# Altium footprint library Connectors.PcbLib: 113 footprints (part 2 of 8)
Each footprint in its own frame and in the unit in brackets; x right, y up, seen from the top. Pads: shape width x height; smd on the part's side, far side on the other; paste and mask are expansions set on the pad; w line width, h text height; cw(c..) or ccw(c..) is an arc to the next point about the centre after c.
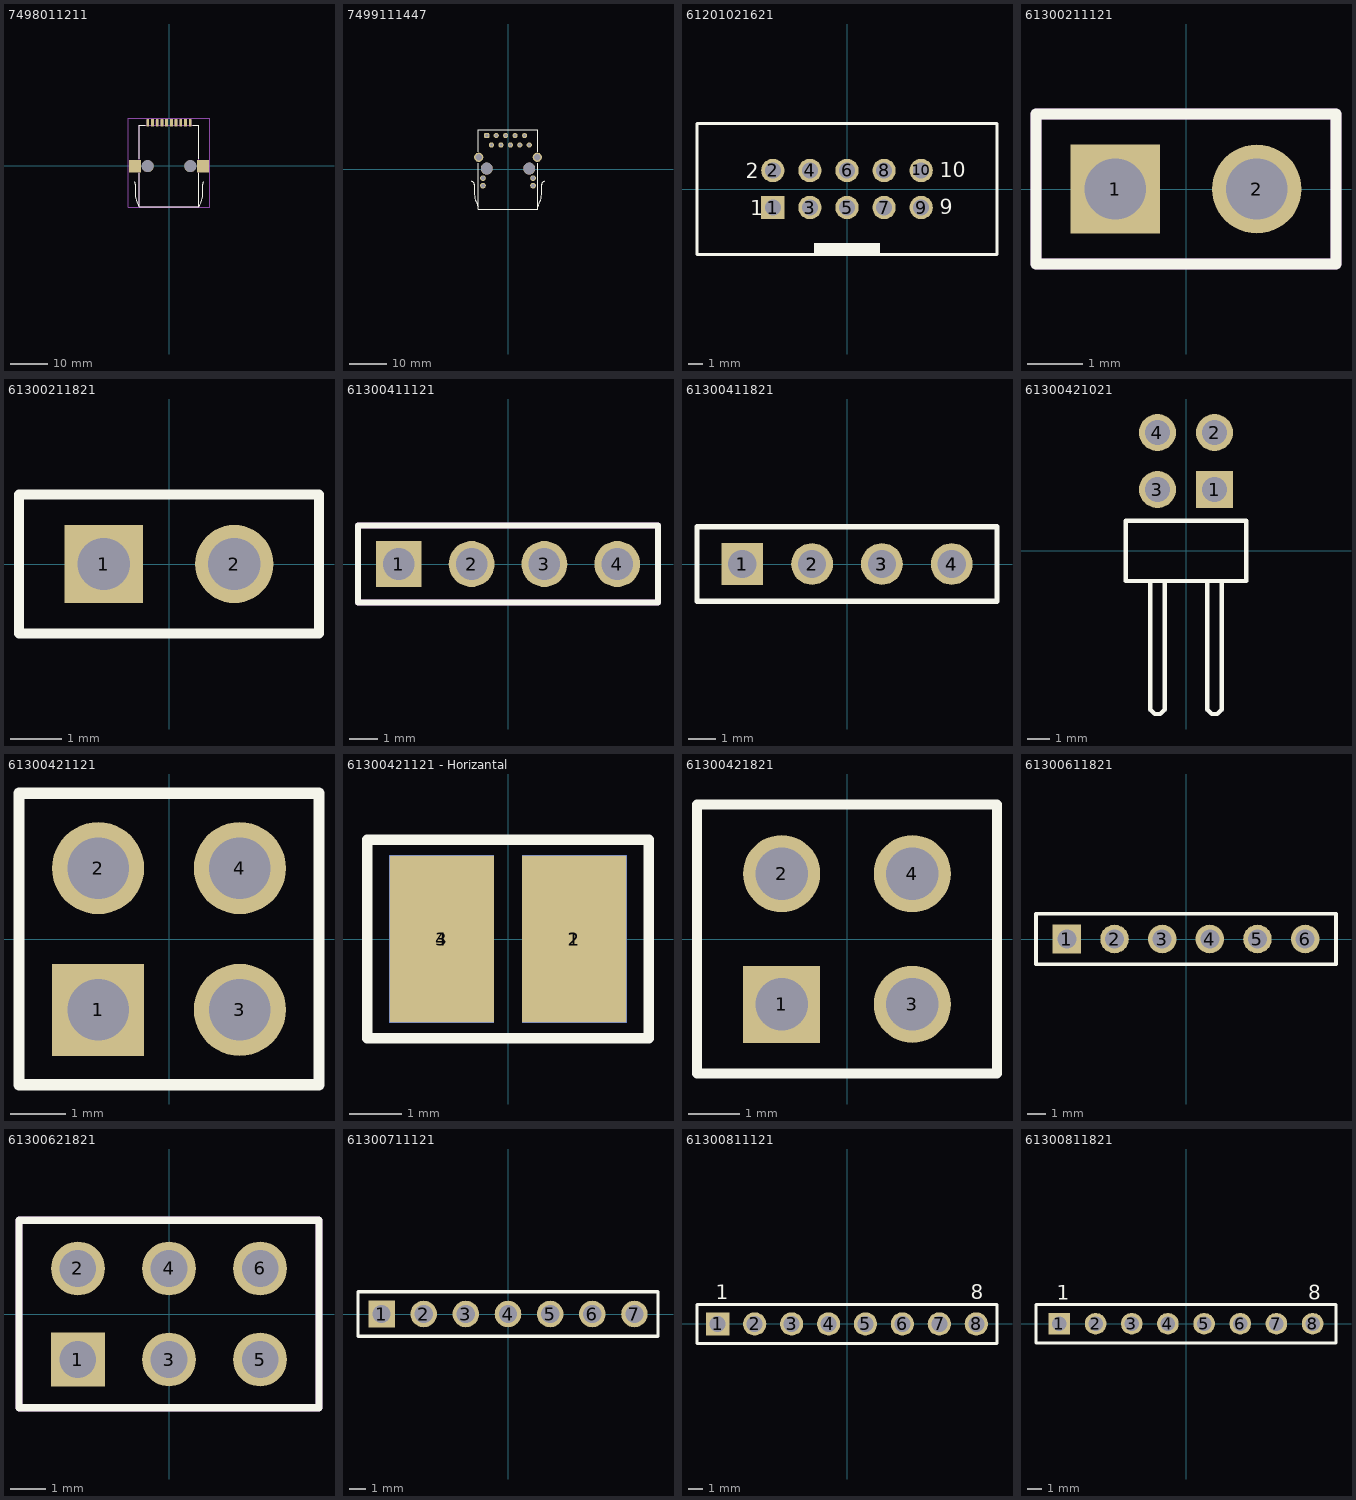
[diagram p1: the footprints below, top view; thin cyan lines are the x and y axes]

## 7498011211 [mm] "LAN Transformer, body 21.65x15.88mm"
height 13.5
pads (14):
  rect 0.76x2.03 smd: 1(-5.715,11.615) 2(-4.445,11.615) 3(-3.175,11.615) 4(-1.905,11.615) 5(-0.635,11.615) 6(0.635,11.615) 7(1.905,11.615) 8(3.175,11.615) 9(4.445,11.615) 10(5.715,11.615)
  round 3.22 hole 3.22 unplated: MH1(-5.715,-0.065) MH2(5.715,-0.065)
  rect 3.3x3.3 smd: Shell(-9.145,-0.065) Shell(9.145,-0.065)
Top Overlay:
  lines w0.2: -9.209,-4.228 cw(c-10.32,-4.84) -9.053,-4.897 ccw(c-5.438,-5.337) -9.08,-5.367 ccw(c15.584,-6.195) -9.009,-8.239 ccw(c-0.59,-6.72) -8.04,-10.925 ; -8.04,-2.025 -8.04,-10.925 ; -8.04,1.875 -8.04,10.925 -6.39,10.925 ; 6.36,10.925 8.04,10.925 8.04,1.875 ; 8.04,-2.025 8.04,-10.925 ; 9.209,-4.228 ccw(c10.32,-4.84) 9.053,-4.897 cw(c5.438,-5.337) 9.08,-5.367 cw(c-15.584,-6.195) 9.009,-8.239 cw(c0.59,-6.72) 8.04,-10.925 ; -8.04,-10.925 8.04,-10.925
Top Assembly:
  rectangle: -6.1,10.925 -5.344,12.348
  rectangle: -4.83,10.925 -4.074,12.348
  rectangle: -3.56,10.925 -2.804,12.348
  rectangle: -2.29,10.925 -1.534,12.348
  rectangle: -1.02,10.925 -0.264,12.348
  rectangle: 0.25,10.925 1.006,12.348
  rectangle: 1.52,10.925 2.276,12.348
  rectangle: 2.79,10.925 3.546,12.348
  rectangle: 4.06,10.925 4.816,12.348
  rectangle: 5.33,10.925 6.086,12.348
  rectangle: -10.3,-1.3 -8.04,1.108
  region: 10.3,1.17 8.04,1.17 8.04,-1.238 10.3,-1.238
  lines w0.2: -8.04,-10.925 8.04,-10.925 8.04,10.925 -8.04,10.925 -8.04,-10.925
  text ".Designator" at -7.498,4.3 h1.5
Mechanical 15:
  lines w0.05: -10.995,-11.125 -10.995,12.83 10.995,12.83 10.995,-11.125 -10.995,-11.125
3D body "7498011211.stp": height 14.82, standoff -2.7, extent -10.249,-10.79 10.25,12.36

## 7499111447 [mm] "LAN Transformer, body 21.3x16mm"
height 13.55
pads (18):
  rrect50% 1.4x1.4 hole 0.89: 1(-5.715,9.09)
  round 1.4 hole 0.89: 2(-4.445,6.55) 3(-3.175,9.09) 4(-1.905,6.55) 5(-0.635,9.09) 6(0.635,6.55) 7(1.905,9.09) 8(3.175,6.55) 9(4.445,9.09) 10(5.715,6.55)
  round 1.52 hole 1.02: 11(-6.725,-2.34) 12(-6.725,-4.37) 13(6.725,-2.34) 14(6.725,-4.37)
  round 3.2 hole 3.2 unplated: MH1(-5.715,0.2) MH2(5.715,0.2)
  round 2.5 hole 1.7: Shell(-7.875,3.25) Shell(7.875,3.25)
Top Overlay:
  lines w0.2: -9.683,-3.231 cw(c-9.9,-4.1) -9.004,-4.1 ; -9.013,-3.972 ccw(c-5.398,-4.412) -9.04,-4.442 ccw(c15.624,-5.27) -8.969,-7.314 ccw(c-0.55,-5.795) -8,-10 ; -8,1.7 -8,-10.65 8,-10.65 8,1.7 ; -8,4.8 -8,10.65 8,10.65 8,4.8 ; 8,-10 ccw(c0.55,-5.795) 8.969,-7.314 ccw(c-15.624,-5.27) 9.04,-4.442 ccw(c5.398,-4.412) 9.013,-3.972 ; 9.004,-4.1 cw(c9.9,-4.1) 9.683,-3.231
3D body "7499111447.stp": height 15.35, standoff -2.98, extent -9.724,-10.65 9.724,10.65

## 61201021621 [mm] "10 pins, straight, gold plating"
height 9.1
pads (10):
  rect 1.6x1.6 hole 1.1: 1(-5.08,-1.27)
  round 1.6 hole 1.1: 2(-5.08,1.27) 3(-2.54,-1.27) 4(-2.54,1.27) 5(0,-1.27) 6(0,1.27) 7(2.54,-1.27) 8(2.54,1.27) 9(5.08,-1.27) 10(5.08,1.27)
Top Overlay:
  rectangle: -2.25,-4.5 2.25,-3.7
  lines w0.2: -10.28,-4.5 10.28,-4.5 10.28,4.5 -10.28,4.5 -10.28,-4.5
  text "1" at -6.64,-1.8 h1.02
  text "2" at -6.94,0.74 h1.02
  text "10" at 6.34,0.8 h1.02
  text "9" at 6.34,-1.74 h1.02
3D body "61201021621.stp": height 9.13, standoff -2.98, extent -10.18,-4.425 10.18,4.75

## 61300211121 [mm] "Pin Header, pitch 2.54 mm, THT, Vertical, single row, 2p"
height 8.54
pads (2):
  rect 1.6x1.6 hole 1.1: 1(-1.27,0)
  round 1.6 hole 1.1: 2(1.27,0)
Top Overlay:
  lines w0.2: -2.69,-1.345 2.69,-1.345 2.69,1.345 -2.69,1.345 -2.69,-1.345
Top Assembly:
  rectangle: -1.77,-0.461 -0.77,0.539
  rectangle: 0.77,-0.5 1.77,0.5
  lines w0.2: -2.69,-1.345 2.69,-1.345 2.69,1.345 -2.69,1.345 -2.69,-1.345
  text ".Designator" at 0.233,-3.499 h0.7
3D body "61300211121.stp": height 8.57, standoff -2.97, extent -2.54,-1.27 2.54,1.27

## 61300211821 [mm] "Socket Header, Pitch 2.54 mm, THT, Vertical, single row, 2p"
height 8.5
pads (2):
  rect 1.52x1.52 hole 1.02: 1(-1.27,0)
  round 1.52 hole 1.02: 2(1.27,0)
Top Overlay:
  lines w0.2: -2.915,-1.35 2.915,-1.35 2.915,1.35 -2.915,1.35 -2.915,-1.35
3D body "61300211821.stp": height 8.55, standoff -3.06, extent -2.79,-1.25 2.79,1.25

## 61300411121 [mm] "Pin Header, pitch 2.54 mm, THT, Vertical, single row, 4p"
height 8.54
pads (4):
  rect 1.6x1.6 hole 1.1: 1(-3.81,0)
  round 1.6 hole 1.1: 2(-1.27,0) 3(1.27,0) 4(3.81,0)
Top Overlay:
  lines w0.2: -5.23,-1.345 -5.23,1.345 5.23,1.345 5.23,-1.345 -5.23,-1.345
Top Assembly:
  rectangle: 3.318,-0.5 4.318,0.5
  rectangle: 0.778,-0.5 1.778,0.5
  rectangle: -4.302,-0.492 -3.302,0.508
  rectangle: -1.762,-0.5 -0.762,0.5
  lines w0.2: -5.23,-1.345 -5.23,1.345 5.23,1.345 5.23,-1.345 -5.23,-1.345
  text "4" at 3.643,-1.139 h0.5
  text "3" at 1.103,-1.139 h0.5
  text "2" at -1.437,-1.139 h0.5
  text "1" at -3.893,-1.139 h0.5
  text ".Designator" at -0.167,2.499 h0.5
3D body "Download_STP_61300411121 (rev1).stp": height 8.55, standoff -2.99, extent -5.08,-1.27 5.08,1.27

## 61300411821 [mm] "Socket Header, Pitch 2.54 mm, THT, Vertical, single row, 4p"
height 8.5
pads (8):
  rect 1.52x1.52 hole 1.02: 1(-3.81,0) 1(-3.81,0)
  round 1.52 hole 1.02: 2(-1.27,0) 2(-1.27,0) 3(1.27,0) 3(1.27,0) 4(3.81,0) 4(3.81,0)
Top Overlay:
  lines w0.2: -5.455,-1.35 5.455,-1.35 5.455,1.35 -5.455,1.35 -5.455,-1.35
3D body "61300411821.stp": height 8.55, standoff -3.05, extent -5.33,-1.25 5.33,1.25

## 61300421021 [mm] "Pin Header, pitch 2.54 mm, THT, Angled, dual row, 4p"
height 5.08
pads (4):
  rect 1.65x1.65 hole 1.1: 1(1.27,2.73)
  round 1.65 hole 1.1: 2(1.27,5.27) 3(-1.27,2.73) 4(-1.27,5.27)
Top Overlay:
  lines w0.2: -1.59,-1.345 -1.59,-7.07 -1.39,-7.27 -1.15,-7.27 -0.95,-7.07 -0.95,-1.345 ; 0.95,-1.345 0.95,-7.07 1.15,-7.27 1.39,-7.27 1.59,-7.07 1.59,-1.345 ; -2.69,-1.345 -2.69,1.345 2.69,1.345 2.69,-1.345 -2.69,-1.345
3D body "61300421021.stp": height 5.12, standoff -2.96, extent -2.54,-7.27 2.54,5.63

## 61300421121 [mm] "Pin Header, pitch 2.54 mm, THT, Vertical, dual row, 4p"
height 8.54
pads (4):
  rect 1.65x1.65 hole 1.1: 1(-1.27,-1.27)
  round 1.65 hole 1.1: 2(-1.27,1.27) 3(1.27,-1.27) 4(1.27,1.27)
Top Overlay:
  lines w0.2: -2.69,-2.615 -2.69,2.615 2.69,2.615 2.69,-2.615 -2.69,-2.615
3D body "61300421121.stp": height 8.59, standoff -2.95, extent -2.54,-2.54 2.54,2.54

## 61300421121 - Horizantal [mm] "Pin Header, pitch 2.54 mm, THT, Vertical, dual row, 4p"
height 8.54
pads (4):
  rect 2x3.2 smd far side: 1(1.27,0) 3(-1.27,0)
  rect 2x3.2 smd: 2(1.27,0) 4(-1.27,0)
Top Overlay:
  lines w0.2: -2.69,-1.9 2.69,-1.9 2.69,1.9 -2.69,1.9 -2.69,-1.9
3D body "61300421121.stp": height 1.77, standoff -3.31, extent -2.54,-1.27 2.54,10.27

## 61300421821 [mm] "Socket Header, Pitch 2.54 mm, THT, Vertical, dual row, 4p"
height 8.4
pads (4):
  rect 1.5x1.5 hole 1.02: 1(-1.27,-1.27)
  round 1.5 hole 1.02: 2(-1.27,1.27) 3(1.27,-1.27) 4(1.27,1.27)
Top Overlay:
  lines w0.2: -2.915,-2.615 2.915,-2.615 2.915,2.615 -2.915,2.615 -2.915,-2.615
3D body "61300421821.stp": height 8.45, standoff -3.05, extent -2.79,-2.54 2.79,2.54

## 61300611821 [mm] "Socket Header, Pitch 2.54 mm, THT, Vertical, single row, 6p"
height 8.5
pads (6):
  rect 1.52x1.52 hole 1.02: 1(-6.35,0)
  round 1.52 hole 1.02: 2(-3.81,0) 3(-1.27,0) 4(1.27,0) 5(3.81,0) 6(6.35,0)
Top Overlay:
  lines w0.2: -7.995,-1.35 7.995,-1.35 7.995,1.35 -7.995,1.35 -7.995,-1.35
3D body "61300611821.stp": height 8.55, standoff -3.06, extent -7.87,-1.25 7.87,1.25

## 61300621821 [mm] "Socket Header, Pitch 2.54 mm, THT, Vertical, dual row, 6p"
height 8.4
pads (6):
  rect 1.5x1.5 hole 1.02: 1(-2.54,-1.27)
  round 1.5 hole 1.02: 2(-2.54,1.27) 3(0,-1.27) 4(0,1.27) 5(2.54,-1.27) 6(2.54,1.27)
Top Overlay:
  lines w0.2: -4.185,-2.615 4.185,-2.615 4.185,2.615 -4.185,2.615 -4.185,-2.615
Top Assembly:
  lines w0.2: -4.185,-2.615 4.185,-2.615 4.185,2.615 -4.185,2.615 -4.185,-2.615
  lines w0.254: -3.036,-1.512 ccw(c-2.782,-1.512) -2.782,-1.766 -2.29,-1.766 ccw(c-2.29,-1.512) -2.036,-1.512 -2.036,-1.02 ccw(c-2.29,-1.02) -2.29,-0.766 -2.782,-0.766 ccw(c-2.782,-1.02) -3.036,-1.02 -3.036,-1.512 ; -3.036,1.028 ccw(c-2.782,1.028) -2.782,0.774 -2.29,0.774 ccw(c-2.29,1.028) -2.036,1.028 -2.036,1.52 ccw(c-2.29,1.52) -2.29,1.774 -2.782,1.774 ccw(c-2.782,1.52) -3.036,1.52 -3.036,1.028 ; -0.496,-1.512 ccw(c-0.242,-1.512) -0.242,-1.766 0.25,-1.766 ccw(c0.25,-1.512) 0.504,-1.512 0.504,-1.02 ccw(c0.25,-1.02) 0.25,-0.766 -0.242,-0.766 ccw(c-0.242,-1.02) -0.496,-1.02 -0.496,-1.512 ; -0.496,1.028 ccw(c-0.242,1.028) -0.242,0.774 0.25,0.774 ccw(c0.25,1.028) 0.504,1.028 0.504,1.52 ccw(c0.25,1.52) 0.25,1.774 -0.242,1.774 ccw(c-0.242,1.52) -0.496,1.52 -0.496,1.028 ; 2.044,-1.512 ccw(c2.298,-1.512) 2.298,-1.766 2.79,-1.766 ccw(c2.79,-1.512) 3.044,-1.512 3.044,-1.02 ccw(c2.79,-1.02) 2.79,-0.766 2.298,-0.766 ccw(c2.298,-1.02) 2.044,-1.02 2.044,-1.512 ; 2.044,1.028 ccw(c2.298,1.028) 2.298,0.774 2.79,0.774 ccw(c2.79,1.028) 3.044,1.028 3.044,1.52 ccw(c2.79,1.52) 2.79,1.774 2.298,1.774 ccw(c2.298,1.52) 2.044,1.52 2.044,1.028
  text "3" at -1.314,-1.546 h0.5
  text "4" at -1.314,1.028 h0.5
  text "1" at -3.854,-1.546 h0.5
  text "2" at -3.854,1.028 h0.5
  text "6" at 1.27,1.028 h0.5
  text "5" at 1.27,-1.546 h0.5
  text ".Designator" at -3.499,-0.233 h0.7
3D body "61300621821.stp": height 8.45, standoff -3.05, extent -4.06,-2.54 4.06,2.54

## 61300711121 [mm] "Pin Header, pitch 2.54 mm, THT, Vertical, single row, 7p"
height 8.54
pads (7):
  rect 1.6x1.6 hole 1.1: 1(-7.62,0)
  round 1.6 hole 1.1: 2(-5.08,0) 3(-2.54,0) 4(0,0) 5(2.54,0) 6(5.08,0) 7(7.62,0)
Top Overlay:
  lines w0.2: -9.04,-1.345 -9.04,1.345 9.04,1.345 9.04,-1.345 -9.04,-1.345

## 61300811121 [mm] "Pin Header, pitch 2.54 mm, THT, Vertical, single row, 8p"
height 8.54
pads (8):
  rect 1.6x1.6 hole 1.1: 1(-8.89,0)
  round 1.6 hole 1.1: 2(-6.35,0) 3(-3.81,0) 4(-1.27,0) 5(1.27,0) 6(3.81,0) 7(6.35,0) 8(8.89,0)
Top Overlay:
  lines w0.2: -10.31,-1.345 -10.31,1.345 10.31,1.345 10.31,-1.345 -10.31,-1.345
  text "8" at 8.51,1.7 h1.02
  text "1" at -9.01,1.7 h1.02
3D body "61300811121.stp": height 8.57, standoff -2.97, extent -10.16,-1.27 10.16,1.27

## 61300811821 [mm] "Socket Header, Pitch 2.54 mm, THT, Vertical, single row, 8p"
height 8.5
pads (8):
  rect 1.52x1.52 hole 1.02: 1(-8.89,0)
  round 1.52 hole 1.02: 2(-6.35,0) 3(-3.81,0) 4(-1.27,0) 5(1.27,0) 6(3.81,0) 7(6.35,0) 8(8.89,0)
Top Overlay:
  lines w0.2: -10.535,-1.35 10.535,-1.35 10.535,1.35 -10.535,1.35 -10.535,-1.35
  text "1" at -9.08,1.7 h1.02
  text "8" at 8.58,1.7 h1.02
3D body "61300811821.stp": height 8.55, standoff -3.06, extent -10.41,-1.25 10.41,1.25